# Altium footprint library Clema_RES.PcbLib: 1 footprints
Each footprint in its own frame and in the unit in brackets; x right, y up, seen from the top. Pads: shape width x height; smd on the part's side, far side on the other; paste and mask are expansions set on the pad; w line width, h text height; cw(c..) or ccw(c..) is an arc to the next point about the centre after c.
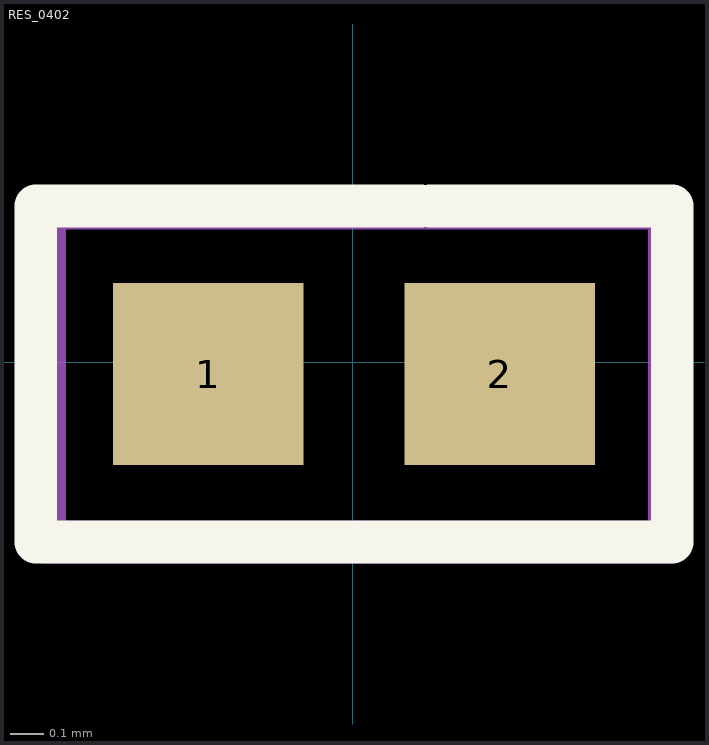
[diagram p0: the footprint, top view; thin cyan lines are the x and y axes]

## RES_0402 [mm]
pads (2):
  rect 0.566x0.54 smd: 1(-0.428,-0.035) 2(0.437,-0.035)
Top Overlay:
  lines w0.127: -0.222,-0.533 -0.94,-0.533 -0.94,0.464 0.203,0.464 ; -0.203,-0.533 0.949,-0.533 0.949,0.464 0.231,0.464
Top Paste:
  region: 0.139,-0.265 0.139,0.195 0.179,0.235 0.68,0.235 0.72,0.195 0.72,-0.265 0.68,-0.305 0.179,-0.305
  region: -0.131,-0.265 -0.131,0.195 -0.171,0.235 -0.671,0.235 -0.711,0.195 -0.711,-0.265 -0.671,-0.305 -0.171,-0.305
Mechanical 15:
  lines w0.003: 0.065,0.344 0.066,0.345
  lines w0.127: -0.914,-0.533 0.94,-0.533 0.94,0.457 -0.914,0.457 -0.914,-0.533
3D body "RC0402FR-070RL.STEP": height 0.4, standoff 0, extent -0.5,-0.288 0.5,0.212